# Altium footprint library AVP32F08_EVM_Rev1.1.PcbLib: 50 footprints (part 1 of 4)
Each footprint in its own frame and in the unit in brackets; x right, y up, seen from the top. Pads: shape width x height; smd on the part's side, far side on the other; paste and mask are expansions set on the pad; w line width, h text height; cw(c..) or ccw(c..) is an arc to the next point about the centre after c.
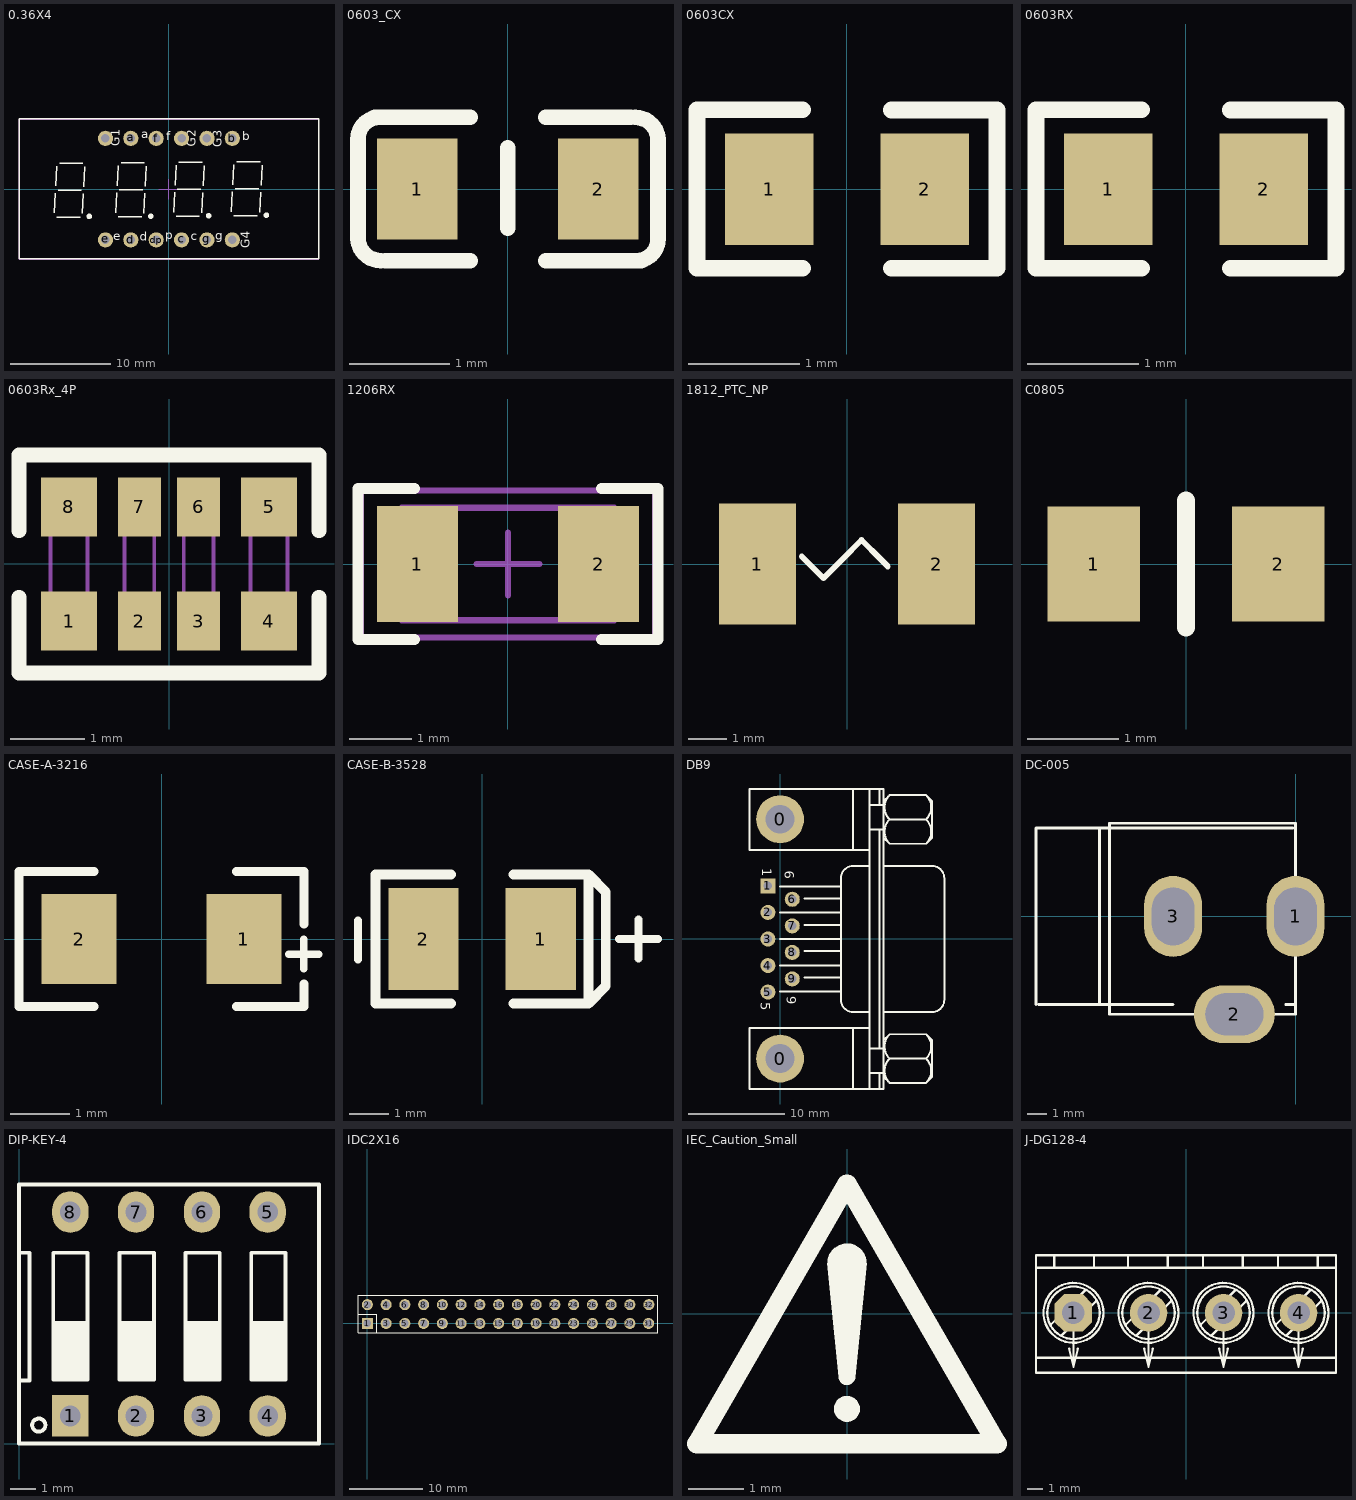
[diagram p0: the footprints below, top view; thin cyan lines are the x and y axes]

## 0.36X4 [mil] "4位0.36寸数码管"
height 314.96
pads (12):
  round 60 hole 33.46: a(-150,200) b(250,200) c(50,-200) com1(-250,200) com2(50,200) com3(150,200) com4(250,-200) d(-150,-200) dp(-50,-200) e(-250,-200) f(-50,200) g(150,-200)
Top Overlay:
  circle w19.68: c384.42,-102.74 r1
  circle w19.68: c156.42,-104.74 r1
  circle w19.68: c-71.58,-106.74 r1
  circle w19.68: c-313.58,-107.74 r1
  lines w5.91: -451.58,-93.74 -447.58,-15.74 ; -445.58,12.26 -441.58,90.26 ; -441.58,-110.74 -349.58,-110.74 ; -436.58,-3.74 -344.58,-3.74 ; -430.58,102.26 -338.58,102.26 ; -340.58,-95.74 -336.58,-17.74 ; -334.58,10.26 -330.58,88.26 ; -209.58,-92.74 -205.58,-14.74 ; -203.58,13.26 -199.58,91.26 ; -199.58,-109.74 -107.58,-109.74 ; -194.58,-2.74 -102.58,-2.74 ; -188.58,103.26 -96.58,103.26 ; -98.58,-94.74 -94.58,-16.74 ; -92.58,11.26 -88.58,89.26 ; 18.42,-90.74 22.42,-12.74 ; 24.42,15.26 28.42,93.26 ; 28.42,-107.74 120.42,-107.74 ; 33.42,-0.74 125.42,-0.74 ; 39.42,105.26 131.42,105.26 ; 129.42,-92.74 133.42,-14.74 ; 135.42,13.26 139.42,91.26 ; 246.42,-88.74 250.42,-10.74 ; 252.42,17.26 256.42,95.26 ; 256.42,-105.74 348.42,-105.74 ; 261.42,1.26 353.42,1.26 ; 267.42,107.26 359.42,107.26 ; 357.42,-90.74 361.42,-12.74 ; 363.42,15.26 367.42,93.26 ; -589.58,-274.74 -589.58,276.44 591.52,276.44 591.52,-274.74 -589.58,-274.74
  text "b" at 288.42,180.26 h60
  text "a" at -109.58,188.26 h60
  text "G1" at -182.58,169.26 h60
  text "G2" at 118.42,166.26 h60
  text "G3" at 219.42,165.26 h60
  text "c" at 85.42,-213.74 h60
  text "d" at -115.58,-214.74 h60
  text "e" at -218.58,-212.74 h60
  text "f" at -10.58,181.26 h60
  text "g" at 183.42,-211.74 h60
  text "p" at -13.58,-208.74 h60
  text "G4" at 330.42,-233.74 h60
Mechanical 13:
  lines w3.94: -590.55,-275.59 590.55,-275.59 590.55,275.59 -590.55,275.59 -590.55,-275.59
Mechanical 15:
  lines w3.94: -39.37,0 39.37,0 ; 0,-39.37 0,39.37
3D body "nixie36-4a.stp": height 283.46, standoff -118.11, extent -590.56,-275.99 590.54,275.58

## 0603_CX [mm] "加长型  脚距1.8mm"
pads (2):
  rect 0.8x1 smd mask+0.051: 1(-0.9,0) 2(0.9,0)
Top Overlay:
  lines w0.154: -1.489,-0.5 -1.489,0.5 ; -1.489,-0.485 ccw(c-1.263,-0.485) -1.263,-0.711 ; -1.489,0.499 cw(c-1.277,0.499) -1.277,0.711 ; -1.321,0.711 -0.375,0.711 ; -1.219,-0.711 -0.375,-0.711 ; 0,-0.388 0,0.412 ; 0.378,-0.711 1.323,-0.711 ; 0.378,0.711 1.222,0.711 ; 1.265,0.711 cw(c1.265,0.485) 1.492,0.485 ; 1.28,-0.711 ccw(c1.28,-0.499) 1.492,-0.499 ; 1.492,-0.5 1.492,0.5
3D body "User Library-CAP0603-1.STEP": height 0.68, standoff -0.08, extent -0.711,-0.355 0.813,0.407

## 0603CX [mm] "标准型  脚距1.4mm"
pads (2):
  rect 0.8x1 smd mask+0.102: 1(-0.7,0) 2(0.7,0)
Top Overlay:
  lines w0.15: -0.4,-0.711 -1.35,-0.711 -1.35,0.716 -0.4,0.716 ; 0.4,-0.711 1.35,-0.711 1.35,0.713 0.4,0.713
3D body "User Library-CAP0603-1.STEP": height 0.68, standoff -0.08, extent -0.762,-0.381 0.762,0.381

## 0603RX [mm] "标准型 间距1.4mm  焊盘尺寸0.8/1mm"
pads (2):
  rect 0.8x1 smd mask+0.102: 1(-0.7,0) 2(0.7,0)
Top Overlay:
  lines w0.15: -0.4,-0.711 -1.35,-0.711 -1.35,0.716 -0.4,0.716 ; 0.4,-0.711 1.35,-0.711 1.35,0.713 0.4,0.713
3D body "RES-0603.step": height 0.43, standoff -0.03, extent -0.8,-0.4 0.8,0.4

## 0603Rx_4P [mm]
height 1.2
pads (8):
  rect 0.75x0.8 smd mask+0.051: 1(-1.35,-0.77) 4(1.35,-0.77) 5(1.35,0.77) 8(-1.35,0.77)
  rect 0.58x0.8 smd mask+0.051: 2(-0.4,-0.77) 3(0.4,-0.77) 6(0.4,0.77) 7(-0.4,0.77)
Top Overlay:
  lines w0.2: -2.025,-0.45 -2.025,-1.47 2.025,-1.47 2.025,-0.45 ; -2.025,0.45 -2.025,1.47 2.025,1.47 2.025,0.45
Mechanical 13:
  lines w0.05: -1.6,-0.8 -1.6,0.8 -1.1,0.8 -1.1,-0.8 -1.6,-0.8 ; -0.6,-0.8 -0.6,0.8 -0.2,0.8 -0.2,-0.8 -0.6,-0.8 ; 0.2,-0.8 0.2,0.8 0.6,0.8 0.6,-0.8 0.2,-0.8 ; 1.1,-0.8 1.1,0.8 1.6,0.8 1.6,-0.8 1.1,-0.8
3D body "User Library-Array-1206-4Way-Var1.STEP": height 0.5, standoff 0, extent -1.549,-0.8 1.651,0.8

## 1206RX [mm]
pads (2):
  rect 1.3x1.85 smd: 1(-1.45,0) 2(1.45,0)
Top Overlay:
  lines w0.178: -1.5,-1.21 -2.4,-1.21 -2.4,1.21 -1.5,1.21 ; 1.5,-1.21 2.4,-1.21 2.4,1.21 1.5,1.21
Mechanical 5:
  lines w0.1: -1.7,-0.9 1.7,-0.9 ; -1.7,0.9 1.7,0.9
Mechanical 13:
  lines w0.1: -1.7,-0.9 1.7,-0.9 ; -1.7,0.9 1.7,0.9
Mechanical 15:
  lines w0.1: -0.5,0 0.5,0 ; 0,-0.5 0,0.5 ; -2.35,-1.175 2.35,-1.175 2.35,1.175 -2.35,1.175 -2.35,-1.175
3D body "R1206.STEP": height 0.6, standoff 0, extent -1.571,-0.8 1.629,0.8

## 1812_PTC_NP [mil]
height 47.24
pads (2):
  rect 80x125 smd: 1(-92.5,0) 2(92.5,0)
Top Overlay:
  lines w6: -46.74,7.76 -24.28,-14.69 15.09,24.68 34.77,5 ; -4.77,5 14.91,24.68 42.05,-2.45
3D body "User Library-0ZCG-0_90mm.step": height 19.84, standoff 0.16, extent -83.57,-62.99 93.59,63

## C0805 [mil] "标准型 间距40mil"
height 196.85
pads (2):
  rect 40x50 smd: 1(-40,0) 2(40,0)
Top Overlay:
  lines w7.87: 0,-27.56 0,27.56
3D body "C0805.step": height 36.61, standoff -0.39, extent -59.39,-27.82 58.72,27.3

## CASE-A-3216 [mil] "钽电容"
pads (2):
  rect 50x60 smd: 1(55,0) 2(-55,0)
Top Overlay:
  lines w5: 85,-10 105,-10 ; 95,-20 95,0
  lines w6: -45,-45 -95,-45 -95,45 -45,45 ; 50,-45 95,-45 95,-30 ; 50,45 95,45 95,10
3D body "User Library-AVX_ACASE.STEP": height 67.32, standoff 0, extent -68.93,-33.14 64.93,33

## CASE-B-3528 [mm]
pads (2):
  rect 1.8x2.6 smd: 1(1.5,0) 2(-1.5,0)
Top Overlay:
  lines w0.203: -3.175,-0.525 -3.175,0.475 ; 3.5,0 4.5,0 ; 4,-0.5 4,0.5
  lines w0.254: -0.8,-1.65 -2.727,-1.65 -2.727,1.65 -0.8,1.65 ; 0.8,-1.65 2.727,-1.65 ; 0.8,1.65 2.727,1.65 ; 2.727,-1.65 2.727,1.65 ; 2.727,-1.65 3.163,-1.2 3.163,1.2 2.727,1.65
3D body "User Library-AVX_BCASE.STEP": height 2.03, standoff 0, extent -1.85,-1.465 1.85,1.465

## DB9 [mil]
pads (11):
  round 196.67 hole 118.33: 0(0,-492.08) 0(0,492.08)
  rect 62x62 hole 35: 1(-50,217.92)
  round 62 hole 35: 2(-50,108.75) 3(-50,-0.42) 4(-50,-109.58) 5(-50,-218.75) 6(50,162.92) 7(50,53.75) 8(50,-55.42) 9(50,-164.58)
Top Overlay:
  lines w8: 0,-217.08 250,-217.08 ; 0,-108.75 250,-108.75 ; 0,-0.42 250,-0.42 ; 0,107.92 250,107.92 ; 0,216.25 250,216.25 ; 100,-158.75 250,-158.75 ; 100,-50.42 250,-50.42 ; 100,57.92 250,57.92 ; 100,166.25 250,166.25 ; 300,-617.08 300,-367.08 ; 300,366.25 300,616.25 ; 366.67,-617.08 366.67,616.25 ; 366.67,-550.42 425,-550.42 ; 366.67,-450.42 425,-450.42 ; 366.67,-367.08 -125,-367.08 -125,-617.08 425,-617.08 425,616.25 -125,616.25 -125,366.25 366.67,366.25 ; 366.67,-300.42 300,-300.42 cw(c300,-250.42) 250,-250.42 250,249.58 cw(c300,249.58) 300,299.58 366.67,299.58 ; 366.67,449.58 425,449.58 ; 366.67,549.58 425,549.58 ; 408.33,-617.08 408.33,-550.42 ; 408.33,-450.42 408.33,449.58 ; 408.33,549.58 408.33,616.25 ; 425,-567.08 450,-592.08 600,-592.08 625,-567.08 625,-417.08 600,-392.08 450,-392.08 425,-417.08 ; 425,-300.42 625,-300.42 ccw(c625,-250.42) 675,-250.42 675,249.58 ccw(c625,249.58) 625,299.58 425,299.58 ; 425,416.25 450,391.25 600,391.25 625,416.25 625,566.25 600,591.25 450,591.25 425,566.25 ; 449.91,-592.17 cw(c500,-542.08) 449.91,-492 ; 449.91,-492.17 cw(c500,-442.08) 449.91,-392 ; 449.91,391.16 cw(c500,441.25) 449.91,491.34 ; 449.91,491.16 cw(c500,541.25) 449.91,591.34 ; 450,-492.08 600,-492.08 ; 450,491.25 600,491.25 ; 600.09,-592.17 ccw(c550,-542.08) 600.09,-492 ; 600.09,-492.17 ccw(c550,-442.08) 600.09,-392 ; 600.09,391.16 ccw(c550,441.25) 600.09,491.34 ; 600.09,491.16 ccw(c550,541.25) 600.09,591.34
  text "6" at 20,279.58 h39.37
  text "1" at -74,291 h39.37
  text "5" at -80,-260.42 h39.37
  text "9" at 27,-236 h39.37
3D body "DB-Male.STEP": height 124.02, standoff -521.65, extent -107.74,-601 549.74,599.79

## DC-005 [mm] "接口大小9X11MM    5.5-2.1mm"
height 11
pads (3):
  oval 3x4.2 hole 2.2 slot 3 at 90 deg: 1(0,0) 3(-6.35,0)
  oval 4.2x3 hole 2.2 slot 3 at 0 deg: 2(-3.175,-5.08)
Top Overlay:
  lines w0.15: -13.462,-4.572 -13.462,4.572 -0.127,4.572 ; -13.335,-4.572 -6.35,-4.572 ; -10.16,-4.572 -10.16,4.572 ; -0.508,-4.572 0,-4.572 0,-2.54 ; 0,2.54 0,4.572 ; -9.652,-5.08 0,-5.08 0,4.826 -9.652,4.826 -9.652,-5.08
3D body "User Library-CON-077.step": height 11, standoff -4.05, extent -13.703,-5.024 0.447,4.56

## DIP-KEY-4 [mm]
pads (8):
  rect 1.4x1.6 hole 0.8: 1(1.98,1.065)
  oval 1.4x1.6 hole 0.8: 2(4.52,1.065) 3(7.06,1.065) 4(9.6,1.065) 5(9.6,8.935) 6(7.06,8.935) 7(4.52,8.935) 8(1.98,8.935)
Top Overlay:
  circle w0.15: c0.762,0.711 r0.254
  rectangle: 1.323,2.464 2.644,4.724
  rectangle: 3.886,2.464 5.207,4.724
  rectangle: 6.426,2.464 7.747,4.724
  rectangle: 8.966,2.464 10.287,4.724
  lines w0.15: 0,2.438 0.406,2.438 0.406,7.366 0,7.366 ; 11.578,0 0,0 0,10 11.578,9.992 ; 11.58,0 11.58,10 ; 1.323,2.464 2.644,2.464 2.644,7.366 1.323,7.366 1.323,2.464 ; 3.886,2.464 5.207,2.464 5.207,7.366 3.886,7.366 3.886,2.464 ; 6.426,2.464 7.747,2.464 7.747,7.366 6.426,7.366 6.426,2.464 ; 8.966,2.464 10.287,2.464 10.287,7.366 8.966,7.366 8.966,2.464
3D body "User Library-DIPSW8.step": height 7.52, standoff -2.57, extent 0.074,0.174 11.504,9.826

## IDC2X16 [mm] "2.54X32P双排插针"
pads (32):
  rect 1.5x1.5 hole 1: 1(0,0)
  round 1.5 hole 1: 2(0,2.54) 3(2.54,0) 4(2.54,2.54) 5(5.08,0) 6(5.08,2.54) 7(7.62,0) 8(7.62,2.54) 9(10.16,0) 10(10.16,2.54) 11(12.7,0) 12(12.7,2.54) 13(15.24,0) 14(15.24,2.54) 15(17.78,0) 16(17.78,2.54) 17(20.32,0) 18(20.32,2.54) 19(22.86,0) 20(22.86,2.54) 21(25.4,0) 22(25.4,2.54) 23(27.94,0) 24(27.94,2.54) 25(30.48,0) 26(30.48,2.54) 27(33.02,0) 28(33.02,2.54) 29(35.56,0) 30(35.56,2.54) 31(38.1,0) 32(38.125,2.54)
Top Overlay:
  lines w0.15: -1.27,1.27 1.27,1.27 1.27,-1.27 ; 39.37,-1.27 39.37,3.81 ; 39.37,-1.265 -1.27,-1.27 -1.27,3.81 39.37,3.82
3D body "User Library-PLD-xx.step": height 1, standoff -10.4, extent 16.485,-1.357 34.265,3.643
3D body "User Library-PLD-xx.step": height 1, standoff -10.4, extent -1.27,-1.292 16.51,3.708
3D body "User Library-PLD-xx.step": height 1, standoff -10.4, extent 21.565,-1.332 39.345,3.668

## IEC_Caution_Small [mm]
Top Overlay:
  circle w0.254: c0,-1.143 r0.025
  circle w0.356: c0,0.914 r0.178
  circle w0.254: c0,-1.727 r0.108
  region: -0.356,0.914 0.356,0.914 0.152,-1.143 -0.152,-1.143
  lines w0.356: -2.718,-2.362 2.718,-2.362 0,2.345 -2.718,-2.362

## J-DG128-4 [mm]
pads (4):
  oct 2.5x2.5 hole 1.5: 1(-7.5,0)
  round 2.5 hole 1.5: 2(-2.5,0) 3(2.5,0) 4(7.5,0)
Top Overlay:
  circle w0.15: c-2.5,0 r2
  circle w0.15: c-2.5,0 r1.75
  circle w0.15: c-7.5,0 r2
  circle w0.15: c-7.5,0 r1.75
  circle w0.15: c2.5,0 r2
  circle w0.15: c2.5,0 r1.75
  circle w0.15: c7.5,0 r1.75
  circle w0.15: c7.5,0 r2
  lines w0.15: -10,-3 10,-3 ; -10,3 10,3 ; -9.013,-0.791 -6.702,1.52 ; -8.781,3 -8.781,3.839 ; -8.298,-1.52 -5.987,0.791 ; -7.79,-2.389 -7.5,-3.594 ; -7.5,0 -7.5,-3.594 ; -7.21,-2.389 -7.5,-3.594 ; -6.139,3 -6.139,3.839 ; -4.013,-0.791 -1.702,1.52 ; -3.861,3 -3.861,3.839 ; -3.298,-1.52 -0.987,0.791 ; -2.79,-2.389 -2.5,-3.594 ; -2.5,0 -2.5,-3.594 ; -2.21,-2.389 -2.5,-3.594 ; -1.219,3 -1.219,3.839 ; 0.987,-0.791 3.298,1.52 ; 1.139,3 1.139,3.839 ; 1.702,-1.52 4.013,0.791 ; 2.21,-2.389 2.5,-3.594 ; 2.5,0 2.5,-3.594 ; 2.79,-2.389 2.5,-3.594 ; 3.781,3 3.781,3.839 ; 5.987,-0.791 8.298,1.52 ; 6.139,3 6.139,3.839 ; 6.702,-1.52 9.013,0.791 ; 7.21,-2.389 7.5,-3.594 ; 7.5,0 7.5,-3.594 ; 7.79,-2.389 7.5,-3.594 ; 8.781,3 8.781,3.839 ; -10,-4 10,-4 10,3.839 -10,3.839 -10,-4
3D body "SW3dPS-KRM4.STEP": height 10, standoff -4, extent -10,-3.586 10,3.914